# Altium integrated library Components - 26.10.26 - 18.57.IntLib: 1 symbol
Pins are listed as number, name and electrical type; pins without a type are passive.

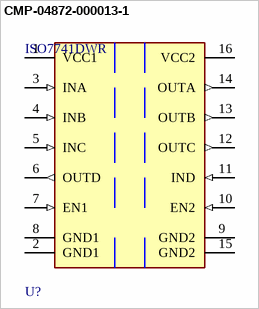
[diagram p0: symbol CMP-04872-000013-1]

## CMP-04872-000013-1
designator U?, comment ISO7741DWR
DGTL ISO 5KV 4CH GEN PURP 16SOIC; Manufacturer: Texas Instruments; Nominal Supply Current: 1.5-18mA; Standoff Height: 0.1mm; Min Supply Voltage: 2.25V; Max Supply Voltage: 5.5V; Max Junction Temp: +150°C; ComponentLink2Description: Datasheet; Temperature Range Low: -55°C; Device Class L2: Interface ICs; Package: DW0016B; Temperature: -55°C to +125°C; Mouser Description: High-speed, low-power, robust EMC quad-channel digital isolator 16-SOIC -55 to 125; Octopart: https://octopart.com/iso7741dwr-texas+instruments-71651905; RoHS: TRUE; Category: IC; Ambient Temperature Range Low: -55°C; Height: 2.65mm; Device Class L3: unset; Device Class L1: Integrated Circuits (ICs); Digikey Description: DGTL ISO 5KV 4CH GEN PURP 16SOIC; Automotive: No; Temperature Range High: +125°C; Ambient Temperature Range High: +125°C; Lead Free: Yes; Manufacturer Part Number: ISO7741DWR; ComponentLink2URL: http://www.ti.com/lit/ds/symlink/iso7741.pdf; Ipc Land Pattern Name: SOIC127P1030X265-16
footprint FP-DW0016B-MFG
footprint FP-DW0016B-IPC_A
footprint FP-DW0016B-IPC_C
footprint FP-DW0016B-IPC_B
pins: 1 VCC1 (power), 2 GND1 (power), 3 INA (in), 4 INB (in), 5 INC (in), 6 OUTD (out), 7 EN1 (in), 8 GND1 (power), 9 GND2 (power), 10 EN2 (in), 11 IND (in), 12 OUTC (out), 13 OUTB (out), 14 OUTA (out), 15 GND2 (power), 16 VCC2 (power)